# EAGLE library part RK806-1 (library RK806-1)
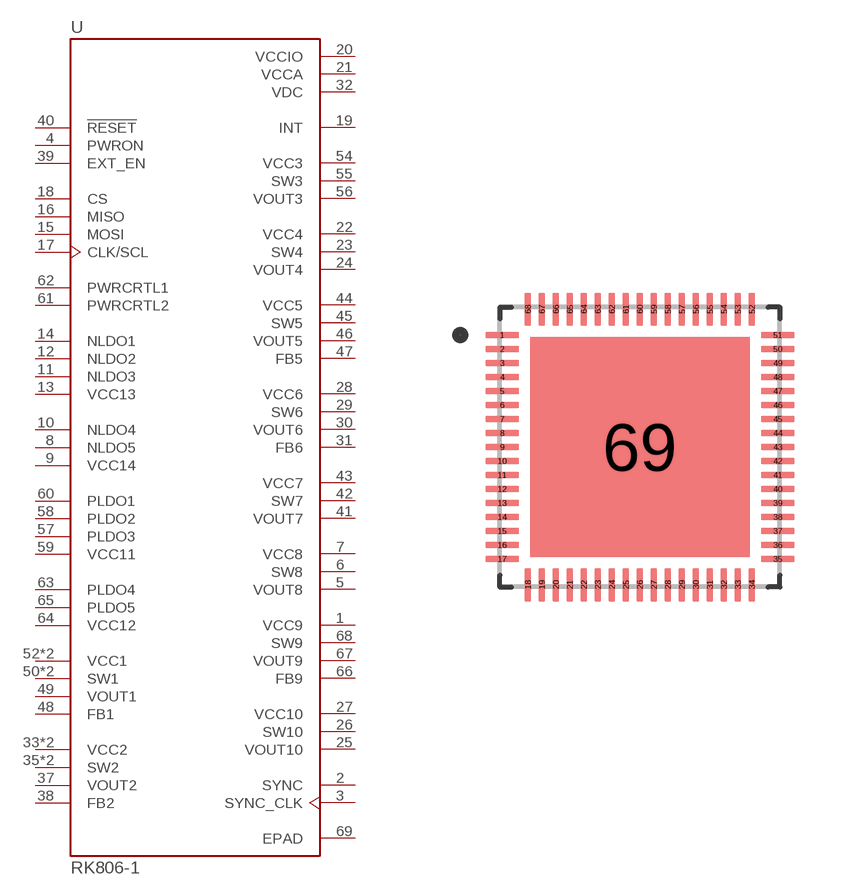
[diagram p0: symbol with the pads of QFN35P700X700X90-69N; footprint QFN35P700X700X90-69N]

Designator prefix U

## RK806-1 (DESCRIPTION: RK806S-5 Dedicated RK3576 Power Management IC; LCSC: C49174044; MANUFACTURER: Rockchip; MAXIMUM_PACKAGE_HEIGHT: 0.90mm; MPN: RK806S-5; PARTREV: 1.3; SOURCE_URL: https://www.lcsc.com/product-detail/PMIC-Solutions_Rockchip-RK806S-5_C49174044.html; STANDARD: IPC-7351B)  [QFN35P700X700X90-69N]
1  VCC9  pwr
2  SYNC
3  SYNC_CLK
4  PWRON  in
5  VOUT8  pas
6  SW8  out
7  VCC8  pwr
8  NLDO5
9  VCC14  pwr
10  NLDO4  out
11  NLDO3  out
12  NLDO2  out
13  VCC13  pwr
14  NLDO1  out
15  MOSI
16  MISO
17  CLK/SCL  in
18  CS  in
19  INT  out
20  VCCIO  pwr
21  VCCA  pwr
22  VCC4  pwr
23  SW4  out
24  VOUT4  pas
25  VOUT10  pas
26  SW10  out
27  VCC10  pwr
28  VCC6  pwr
29  SW6  out
30  VOUT6  pas
31  FB6  in
32  VDC  pwr
33  VCC2  pwr
34  VCC2  pwr
35  SW2  out
36  SW2  out
37  VOUT2  pas
38  FB2  in
39  EXT_EN
40  !RESET
41  VOUT7  pas
42  SW7  out
43  VCC7  pwr
44  VCC5  pwr
45  SW5  out
46  VOUT5  pas
47  FB5  in
48  FB1  in
49  VOUT1  pas
50  SW1  out
51  SW1  out
52  VCC1  pwr
53  VCC1  pwr
54  VCC3  pwr
55  SW3  out
56  VOUT3  pas
57  PLDO3  out
58  PLDO2  out
59  VCC11  pwr
60  PLDO1  out
61  PWRCRTL2
62  PWRCRTL1
63  PLDO4  out
64  VCC12  pwr
65  PLDO5  out
66  FB9  in
67  VOUT9  pas
68  SW9  out
69  EPAD  pas

## Footprint QFN35P700X700X90-69N (pad centres in mm)
smd 0.84 x 0.17: 1 -3.445,2.8; 2 -3.445,2.45; 3 -3.445,2.1; 4 -3.445,1.75; 5 -3.445,1.4; 6 -3.445,1.05; 7 -3.445,0.7; 8 -3.445,0.35; 9 -3.445,0; 10 -3.445,-0.35; 11 -3.445,-0.7; 12 -3.445,-1.05; 13 -3.445,-1.4; 14 -3.445,-1.75; 15 -3.445,-2.1; 16 -3.445,-2.45; 17 -3.445,-2.8; 35 3.445,-2.8; 36 3.445,-2.45; 37 3.445,-2.1; 38 3.445,-1.75; 39 3.445,-1.4; 40 3.445,-1.05; 41 3.445,-0.7; 42 3.445,-0.35; 43 3.445,0; 44 3.445,0.35; 45 3.445,0.7; 46 3.445,1.05; 47 3.445,1.4; 48 3.445,1.75; 49 3.445,2.1; 50 3.445,2.45; 51 3.445,2.8
smd 0.17 x 0.84: 18 -2.8,-3.445; 19 -2.45,-3.445; 20 -2.1,-3.445; 21 -1.75,-3.445; 22 -1.4,-3.445; 23 -1.05,-3.445; 24 -0.7,-3.445; 25 -0.35,-3.445; 26 0,-3.445; 27 0.35,-3.445; 28 0.7,-3.445; 29 1.05,-3.445; 30 1.4,-3.445; 31 1.75,-3.445; 32 2.1,-3.445; 33 2.45,-3.445; 34 2.8,-3.445; 52 2.8,3.445; 53 2.45,3.445; 54 2.1,3.445; 55 1.75,3.445; 56 1.4,3.445; 57 1.05,3.445; 58 0.7,3.445; 59 0.35,3.445; 60 0,3.445; 61 -0.35,3.445; 62 -0.7,3.445; 63 -1.05,3.445; 64 -1.4,3.445; 65 -1.75,3.445; 66 -2.1,3.445; 67 -2.45,3.445; 68 -2.8,3.445
smd 5.49 x 5.49: 69 0,0